# Altium footprint library AQ313001ETG.PcbLib: 1 footprints
Each footprint in its own frame and in the unit in brackets; x right, y up, seen from the top. Pads: shape width x height; smd on the part's side, far side on the other; paste and mask are expansions set on the pad; w line width, h text height; cw(c..) or ccw(c..) is an arc to the next point about the centre after c.
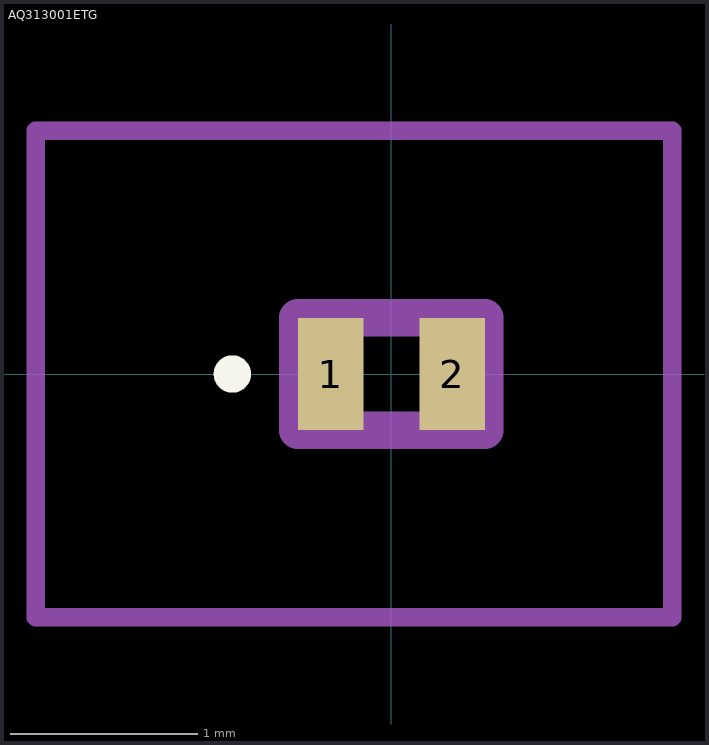
[diagram p0: the footprint, top view; thin cyan lines are the x and y axes]

## AQ313001ETG [mm]
pads (2):
  rect 0.35x0.6 smd: 1(-0.325,0) 2(0.325,0)
Top Overlay:
  lines w0.1: -0.9,0 -0.9,0 ; -0.9,0 ccw(c-0.85,0) -0.8,0 ; -0.9,0 cw(c-0.85,0) -0.8,0 ; -0.8,0 -0.8,0
Mechanical 15:
  lines w0.2: -0.5,-0.3 0.5,-0.3 0.5,0.3 -0.5,0.3 -0.5,-0.3
Mechanical 20:
  lines w0.1: -1.9,-1.3 1.5,-1.3 1.5,1.3 -1.9,1.3 -1.9,-1.3